# Altium schematic symbol library 865080343009.SchLib: 1 symbol
Pins are listed as number, name and electrical type; pins without a type are passive.

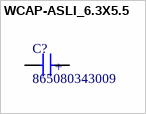
[diagram p0: symbol WCAP-ASLI_6.3X5.5]

## WCAP-ASLI_6.3X5.5
designator C?, comment 865080343009
100 µF 16 V Aluminum Electrolytic Capacitors Radial, Can - SMD 2000 Hrs @ 105°C; MF: {'manufacturer': u'W\xfcrth Elektronik'}; Package: None; Price: None; Value: *; MP: 865080343009; Availability: Unavailable
footprint WCAP-ASLI_6.3X5.5(DXL)
pins: 1 POS, 2 NEG
text: +